# Altium footprint library FootPrintLib_11.PcbLib: 376 footprints (part 14 of 24)
Each footprint in its own frame and in the unit in brackets; x right, y up, seen from the top. Pads: shape width x height; smd on the part's side, far side on the other; paste and mask are expansions set on the pad; w line width, h text height; cw(c..) or ccw(c..) is an arc to the next point about the centre after c.
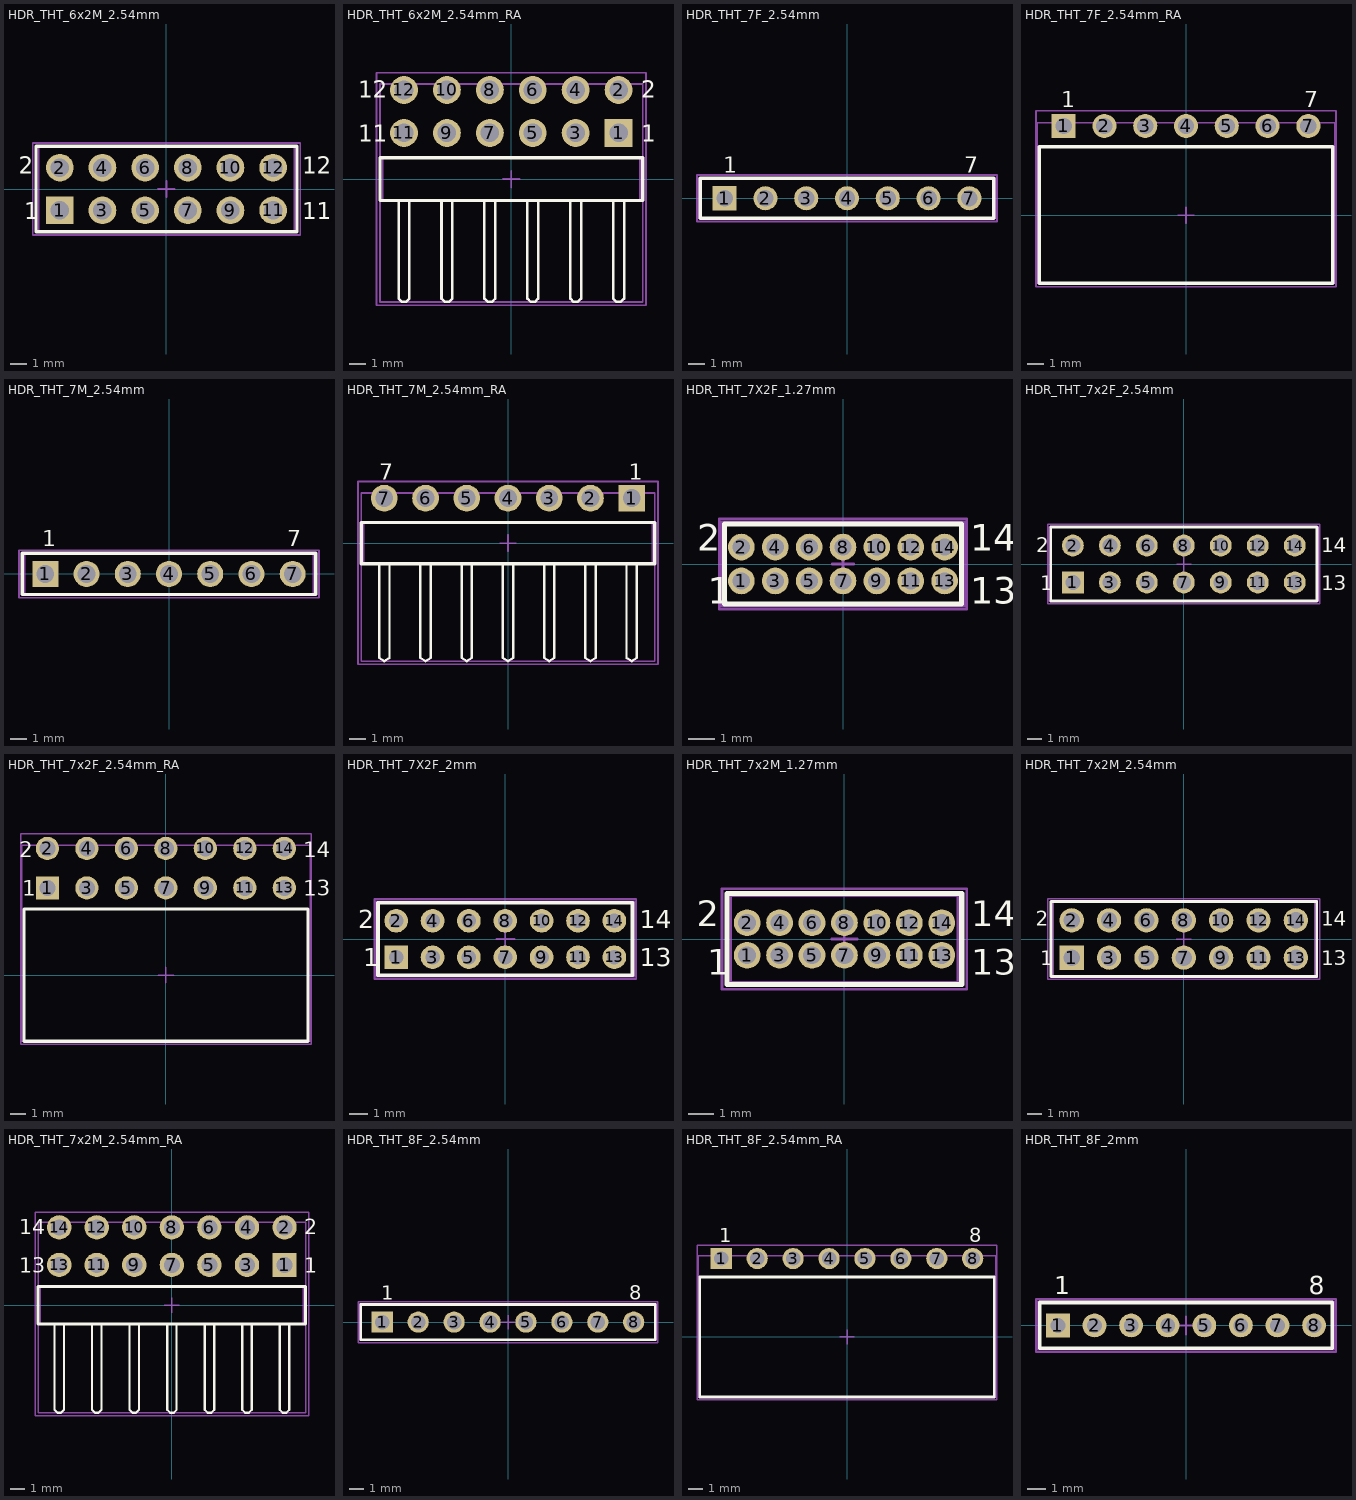
[diagram p13: the footprints below, top view; thin cyan lines are the x and y axes]

## HDR_THT_6x2M_2.54mm [mm] "Pin Header, pitch 2.54 mm, THT, Vertical, dual row, 12p"
height 8.54
pads (12):
  rect 1.65x1.65 hole 1.1: 1(-6.35,-1.27)
  round 1.65 hole 1.1: 2(-6.35,1.27) 3(-3.81,-1.27) 4(-3.81,1.27) 5(-1.27,-1.27) 6(-1.27,1.27) 7(1.27,-1.27) 8(1.27,1.27) 9(3.81,-1.27) 10(3.81,1.27) 11(6.35,-1.27) 12(6.35,1.27)
Top Overlay:
  lines w0.2: -7.77,-2.54 -7.77,2.54 7.77,2.54 7.77,-2.54 -7.77,-2.54
  text "12" at 8.08,0.9 h1
  text "11" at 8.08,-1.8 h1
  text "2" at -8.78,0.9 h1
  text "1" at -8.48,-1.8 h1
Mechanical 11:
  lines w0.1: -7.62,-2.54 -7.62,2.54 7.62,2.54 7.62,-2.54 -7.62,-2.54
Mechanical 13:
  lines w0.1: -7.77,-2.54 -7.77,2.54 7.77,2.54 7.77,-2.54 -7.77,-2.54
Mechanical 15:
  lines w0.1: -0.5,0 0.5,0 ; 0,-0.5 0,0.5 ; -7.97,-2.74 -7.97,2.74 7.97,2.74 7.97,-2.74 -7.97,-2.74
3D body "61301221121.stp": height 8.59, standoff -2.95, extent -7.62,-2.54 7.62,2.54

## HDR_THT_6x2M_2.54mm_RA [mm] "Pin Header, pitch 2.54 mm, THT, Angled, dual row, 12p"
height 5.08
pads (12):
  rect 1.65x1.65 hole 1.1: 1(6.35,2.73)
  round 1.65 hole 1.1: 2(6.35,5.27) 3(3.81,2.73) 4(3.81,5.27) 5(1.27,2.73) 6(1.27,5.27) 7(-1.27,2.73) 8(-1.27,5.27) 9(-3.81,2.73) 10(-3.81,5.27) 11(-6.35,2.73) 12(-6.35,5.27)
Top Overlay:
  lines w0.15: -6.67,-1.335 -6.67,-7.07 -6.47,-7.27 -6.23,-7.27 -6.03,-7.07 -6.03,-1.31 ; -4.13,-1.335 -4.13,-7.07 -3.93,-7.27 -3.69,-7.27 -3.49,-7.07 -3.49,-1.31 ; -1.59,-1.335 -1.59,-7.07 -1.39,-7.27 -1.15,-7.27 -0.95,-7.07 -0.95,-1.31 ; 0.95,-1.335 0.95,-7.07 1.15,-7.27 1.39,-7.27 1.59,-7.07 1.59,-1.31 ; 3.49,-1.335 3.49,-7.07 3.69,-7.27 3.93,-7.27 4.13,-7.07 4.13,-1.31 ; 6.03,-1.335 6.03,-7.07 6.23,-7.27 6.47,-7.27 6.67,-7.07 6.67,-1.31
  lines w0.2: -7.77,-1.27 7.77,-1.27 7.77,1.27 -7.77,1.27 -7.77,-1.27
  text "12" at -9.07,4.8 h1
  text "11" at -9.07,2.2 h1
  text "2" at 7.68,4.8 h1
  text "1" at 7.68,2.2 h1
Mechanical 11:
  lines w0.1: -7.62,-1.27 7.62,-1.27 7.62,1.27 -7.62,1.27 -7.62,-1.27
Mechanical 13:
  lines w0.1: -7.77,-7.27 -7.77,5.63 7.77,5.63 7.77,-7.27 -7.77,-7.27
Mechanical 15:
  lines w0.1: -0.5,0 0.5,0 ; 0,-0.5 0,0.5 ; -7.97,-7.47 -7.97,6.295 7.97,6.295 7.97,-7.47 -7.97,-7.47
3D body "61301221021.stp": height 5.14, standoff -2.94, extent -7.62,-7.27 7.62,5.63

## HDR_THT_7F_2.54mm [mm] "Socket Header, Pitch 2.54 mm, THT, Vertical, single row, 7p"
height 8.5
pads (7):
  rect 1.5x1.5 hole 1.02: 1(-7.62,0)
  round 1.5 hole 1.02: 2(-5.08,0) 3(-2.54,0) 4(0,0) 5(2.54,0) 6(5.08,0) 7(7.62,0)
Top Overlay:
  lines w0.2: -9.14,-1.25 9.14,-1.25 9.14,1.25 -9.14,1.25 -9.14,-1.25
  text "7" at 7.31,1.6 h1
  text "1" at -7.71,1.6 h1
Mechanical 11:
  lines w0.1: -9.14,-1.25 9.14,-1.25 9.14,1.25 -9.14,1.25 -9.14,-1.25
Mechanical 13:
  lines w0.1: -9.265,-1.25 -9.265,1.25 9.265,1.25 9.265,-1.25 -9.265,-1.25
Mechanical 15:
  lines w0.1: -0.5,0 0.5,0 ; 0,-0.5 0,0.5 ; -9.34,-1.45 -9.34,1.45 9.34,1.45 9.34,-1.45 -9.34,-1.45
3D body "61300711821.stp": height 8.55, standoff -3.06, extent -9.14,-1.25 9.14,1.25

## HDR_THT_7F_2.54mm_RA [mm] "Socket Header, Pitch 2.54 mm, THT, Angled, single row, 7p"
height 2.5
pads (7):
  rect 1.5x1.5 hole 1.02: 1(-7.62,5.55)
  round 1.5 hole 1.02: 2(-5.08,5.55) 3(-2.54,5.55) 4(0,5.55) 5(2.54,5.55) 6(5.08,5.55) 7(7.62,5.55)
Top Overlay:
  lines w0.2: -9.14,-4.25 -9.14,4.25 9.14,4.25 9.14,-4.25 -9.14,-4.25
  text "7" at 7.36,6.7 h1
  text "1" at -7.78,6.7 h1
Mechanical 11:
  lines w0.1: -9.14,-4.25 9.14,-4.25 9.14,4.25 -9.14,4.25 -9.14,-4.25
Mechanical 13:
  lines w0.1: -9.265,-4.25 -9.265,5.75 9.265,5.75 9.265,-4.25 -9.265,-4.25
Mechanical 15:
  lines w0.1: -0.5,0 0.5,0 ; 0,-0.5 0,0.5 ; -9.34,-4.45 -9.34,6.5 9.34,6.5 9.34,-4.45 -9.34,-4.45
3D body "613007143121.stp": height 2.55, standoff -3.04, extent -9.14,-4.25 9.14,5.75

## HDR_THT_7M_2.54mm [mm] "Pin Header, pitch 2.54 mm, THT, Vertical, single row, 7p"
height 8.54
pads (7):
  rect 1.6x1.6 hole 1.1: 1(-7.62,0)
  round 1.6 hole 1.1: 2(-5.08,0) 3(-2.54,0) 4(0,0) 5(2.54,0) 6(5.08,0) 7(7.62,0)
Top Overlay:
  lines w0.2: -9.04,-1.27 -9.04,1.27 9.04,1.27 9.04,-1.27 -9.04,-1.27
  text "7" at 7.27,1.7 h1
  text "1" at -7.81,1.7 h1
Mechanical 11:
  lines w0.1: -8.89,-1.27 8.89,-1.27 8.89,1.27 -8.89,1.27 -8.89,-1.27
Mechanical 13:
  lines w0.1: -9.04,-1.27 -9.04,1.27 9.04,1.27 9.04,-1.27 -9.04,-1.27
Mechanical 15:
  lines w0.1: -0.5,0 0.5,0 ; 0,-0.5 0,0.5 ; -9.24,-1.47 -9.24,1.47 9.24,1.47 9.24,-1.47 -9.24,-1.47
3D body "61300711121.stp": height 8.57, standoff -2.97, extent -8.89,-1.27 8.89,1.27

## HDR_THT_7M_2.54mm_RA [mm] "Pin Header, pitch 2.54 mm, THT, Angled, single row, 7p"
height 2.54
pads (7):
  rect 1.65x1.65 hole 1.1: 1(7.62,2.77)
  round 1.65 hole 1.1: 2(5.08,2.77) 3(2.54,2.77) 4(0,2.77) 5(-2.54,2.77) 6(-5.08,2.77) 7(-7.62,2.77)
Top Overlay:
  lines w0.15: -7.94,-1.27 -7.94,-7.07 -7.62,-7.27 -7.3,-7.07 -7.3,-1.27 ; -5.4,-1.27 -5.4,-7.07 -5.08,-7.27 -4.76,-7.07 -4.76,-1.27 ; -2.86,-1.27 -2.86,-7.07 -2.54,-7.27 -2.22,-7.07 -2.22,-1.27 ; -0.32,-1.27 -0.32,-7.07 0,-7.27 0.32,-7.07 0.32,-1.27 ; 2.22,-1.27 2.22,-7.07 2.54,-7.27 2.86,-7.07 2.86,-1.27 ; 4.76,-1.27 4.76,-7.07 5.08,-7.27 5.4,-7.07 5.4,-1.27 ; 7.3,-1.27 7.3,-7.07 7.62,-7.27 7.94,-7.07 7.94,-1.27
  lines w0.2: -9.04,-1.27 9.04,-1.27 9.04,1.27 -9.04,1.27 -9.04,-1.27
  text "1" at 7.45,3.9 h1
  text "7" at -7.94,3.9 h1
Mechanical 11:
  lines w0.1: -8.89,-1.27 8.89,-1.27 8.89,1.27 -8.89,1.27 -8.89,-1.27
Mechanical 13:
  lines w0.1: -9.04,-7.27 9.04,-7.27 9.04,3.09 -9.04,3.09 -9.04,-7.27
Mechanical 15:
  lines w0.1: -0.5,0 0.5,0 ; 0,-0.5 0,0.5 ; -9.24,-7.47 -9.24,3.795 9.24,3.795 9.24,-7.47 -9.24,-7.47
3D body "61300711021.stp": height 2.62, standoff -2.92, extent -8.89,-7.27 8.89,3.09

## HDR_THT_7X2F_1.27mm [mm] "Socket Header, Pitch 1.27 mm, THT, Vertical, dual row, 14p"
height 4.65
pads (14):
  round 1 hole 0.65: 1(-3.81,-0.635) 2(-3.81,0.635) 3(-2.54,-0.635) 4(-2.54,0.635) 5(-1.27,-0.635) 6(-1.27,0.635) 7(0,-0.635) 8(0,0.635) 9(1.27,-0.635) 10(1.27,0.635) 11(2.54,-0.635) 12(2.54,0.635) 13(3.81,-0.635) 14(3.81,0.635)
Top Overlay:
  lines w0.2: -4.445,-1.5 4.445,-1.5 4.445,1.5 -4.445,1.5 -4.445,-1.5
  text "14" at 4.775,0.5 h1
  text "13" at 4.775,-1.5 h1
  text "2" at -5.475,0.5 h1
  text "1" at -5.075,-1.5 h1
Mechanical 11:
  lines w0.1: -4.445,-1.5 4.445,-1.5 4.445,1.5 -4.445,1.5 -4.445,-1.5
Mechanical 13:
  lines w0.1: -4.57,-1.575 -4.57,1.575 4.57,1.575 4.57,-1.575 -4.57,-1.575
Mechanical 15:
  lines w0.1: -0.4,0 0.4,0 ; 0,-0.4 0,0.4 ; -4.645,-1.7 4.645,-1.7 4.645,1.7 -4.645,1.7 -4.645,-1.7
3D body "62201421821.stp": height 4.55, standoff -2.15, extent -4.645,-1.5 4.645,1.5

## HDR_THT_7x2F_2.54mm [mm] "Socket Header, Pitch 2.54 mm, THT, Vertical, dual row, 14p"
height 8.4
pads (14):
  rect 1.5x1.5 hole 1.02: 1(-7.62,-1.27)
  round 1.5 hole 1.02: 2(-7.62,1.27) 3(-5.08,-1.27) 4(-5.08,1.27) 5(-2.54,-1.27) 6(-2.54,1.27) 7(0,-1.27) 8(0,1.27) 9(2.54,-1.27) 10(2.54,1.27) 11(5.08,-1.27) 12(5.08,1.27) 13(7.62,-1.27) 14(7.62,1.27)
Top Overlay:
  lines w0.2: -9.14,-2.54 -9.14,2.54 9.14,2.54 9.14,-2.54 -9.14,-2.54
  text "2" at -10.15,0.8 h1
  text "1" at -9.85,-1.8 h1
  text "13" at 9.45,-1.8 h1
  text "14" at 9.45,0.8 h1
Mechanical 11:
  lines w0.1: -9.14,-2.54 9.14,-2.54 9.14,2.54 -9.14,2.54 -9.14,-2.54
Mechanical 13:
  lines w0.1: -9.265,-2.54 -9.265,2.54 9.265,2.54 9.265,-2.54 -9.265,-2.54
Mechanical 15:
  lines w0.1: -0.5,0 0.5,0 ; 0,-0.5 0,0.5 ; -9.34,-2.74 -9.34,2.74 9.34,2.74 9.34,-2.74 -9.34,-2.74
3D body "61301421821.stp": height 8.45, standoff -3.05, extent -9.14,-2.54 9.14,2.54

## HDR_THT_7x2F_2.54mm_RA [mm] "Socket Header, Pitch 2.54 mm, THT, Angled, dual row, 14p"
height 5.08
pads (14):
  rect 1.5x1.5 hole 1.02: 1(-7.62,5.61)
  round 1.5 hole 1.02: 2(-7.62,8.15) 3(-5.08,5.61) 4(-5.08,8.15) 5(-2.54,5.61) 6(-2.54,8.15) 7(0,5.61) 8(0,8.15) 9(2.54,5.61) 10(2.54,8.15) 11(5.08,5.61) 12(5.08,8.15) 13(7.62,5.61) 14(7.62,8.15)
Top Overlay:
  lines w0.2: -9.14,-4.25 -9.14,4.25 9.14,4.25 9.14,-4.25 -9.14,-4.25
  text "14" at 8.85,7.6 h1
  text "13" at 8.85,5.1 h1
  text "2" at -9.45,7.6 h1
  text "1" at -9.25,5.1 h1
Mechanical 11:
  lines w0.1: -9.14,-4.25 9.14,-4.25 9.14,4.25 -9.14,4.25 -9.14,-4.25
Mechanical 13:
  lines w0.1: -9.29,-4.25 9.29,-4.25 9.29,8.35 -9.29,8.35 -9.29,-4.25
Mechanical 15:
  lines w0.1: -0.5,0 0.5,0 ; 0,-0.5 0,0.5 ; -9.34,-4.45 9.34,-4.45 9.34,9.1 -9.34,9.1 -9.34,-4.45
3D body "613014243121.stp": height 5.05, standoff -3.25, extent -9.14,-4.25 9.14,8.35

## HDR_THT_7X2F_2mm [mm] "Socket Header, Pitch 2.00 mm, THT, Vertical, dual row, 14p"
height 4.45
pads (14):
  rect 1.3x1.3 hole 0.8: 1(-6,-1)
  round 1.3 hole 0.8: 2(-6,1) 3(-4,-1) 4(-4,1) 5(-2,-1) 6(-2,1) 7(0,-1) 8(0,1) 9(2,-1) 10(2,1) 11(4,-1) 12(4,1) 13(6,-1) 14(6,1)
Top Overlay:
  lines w0.2: -7,-2 -7,2 7,2 7,-2 -7,-2
  text "1" at -7.8,-1.5 h1
  text "2" at -8.1,0.6 h1
  text "14" at 7.4,0.6 h1
  text "13" at 7.4,-1.5 h1
Mechanical 11:
  lines w0.1: -7,-2 -7,2 7,2 7,-2 -7,-2
Mechanical 13:
  lines w0.1: -7.15,-2.075 -7.15,2.075 7.15,2.075 7.15,-2.075 -7.15,-2.075
Mechanical 15:
  lines w0.1: -0.5,0 0.5,0 ; 0,-0.5 0,0.5 ; -7.2,-2.2 -7.2,2.2 7.2,2.2 7.2,-2.2 -7.2,-2.2
3D body "62001421821.stp": height 4.35, standoff -2.35, extent -7.25,-2 7.25,2

## HDR_THT_7x2M_1.27mm [mm] "Pin Header, pitch 1.27 mm, THT, Vertical, dual row, 14p"
height 5.65
pads (14):
  round 1.05 hole 0.7: 1(-3.81,-0.635) 2(-3.81,0.635) 3(-2.54,-0.635) 4(-2.54,0.635) 5(-1.27,-0.635) 6(-1.27,0.635) 7(0,-0.635) 8(0,0.635) 9(1.27,-0.635) 10(1.27,0.635) 11(2.54,-0.635) 12(2.54,0.635) 13(3.81,-0.635) 14(3.81,0.635)
Top Overlay:
  lines w0.2: -4.595,-1.775 4.595,-1.775 4.595,1.775 -4.595,1.775 -4.595,-1.775
  text "2" at -5.775,0.5 h1
  text "1" at -5.375,-1.4 h1
  text "13" at 4.975,-1.4 h1
  text "14" at 4.975,0.5 h1
Mechanical 11:
  lines w0.1: -4.445,-1.7 4.445,-1.7 4.445,1.7 -4.445,1.7 -4.445,-1.7
Mechanical 13:
  lines w0.1: -4.595,-1.775 4.595,-1.775 4.595,1.775 -4.595,1.775 -4.595,-1.775
Mechanical 15:
  lines w0.1: -0.5,0 0.5,0 ; 0,-0.5 0,0.5 ; -4.795,-1.975 -4.795,1.975 4.795,1.975 4.795,-1.975 -4.795,-1.975
3D body "62201421121.stp": height 5.33, standoff -2.27, extent -4.445,-1.7 4.445,1.7

## HDR_THT_7x2M_2.54mm [mm] "Pin Header, pitch 2.54 mm, THT, Vertical, dual row, 14p"
height 8.54
pads (14):
  rect 1.65x1.65 hole 1.1: 1(-7.62,-1.27)
  round 1.65 hole 1.1: 2(-7.62,1.27) 3(-5.08,-1.27) 4(-5.08,1.27) 5(-2.54,-1.27) 6(-2.54,1.27) 7(0,-1.27) 8(0,1.27) 9(2.54,-1.27) 10(2.54,1.27) 11(5.08,-1.27) 12(5.08,1.27) 13(7.62,-1.27) 14(7.62,1.27)
Top Overlay:
  lines w0.2: -9.04,-2.54 -9.04,2.54 9.04,2.54 9.04,-2.54 -9.04,-2.54
  text "14" at 9.35,0.9 h1
  text "13" at 9.35,-1.8 h1
  text "2" at -10.05,0.9 h1
  text "1" at -9.75,-1.8 h1
Mechanical 11:
  lines w0.1: -8.89,-2.54 -8.89,2.54 8.89,2.54 8.89,-2.54 -8.89,-2.54
Mechanical 13:
  lines w0.1: -9.04,-2.54 -9.04,2.54 9.04,2.54 9.04,-2.54 -9.04,-2.54
Mechanical 15:
  lines w0.1: -0.5,0 0.5,0 ; 0,-0.5 0,0.5 ; -9.24,-2.74 -9.24,2.74 9.24,2.74 9.24,-2.74 -9.24,-2.74
3D body "61301421121.stp": height 8.59, standoff -2.95, extent -8.89,-2.54 8.89,2.54

## HDR_THT_7x2M_2.54mm_RA [mm] "Pin Header, pitch 2.54 mm, THT, Angled, dual row, 14p"
height 5.08
pads (14):
  rect 1.65x1.65 hole 1.1: 1(7.62,2.73)
  round 1.65 hole 1.1: 2(7.62,5.27) 3(5.08,2.73) 4(5.08,5.27) 5(2.54,2.73) 6(2.54,5.27) 7(0,2.73) 8(0,5.27) 9(-2.54,2.73) 10(-2.54,5.27) 11(-5.08,2.73) 12(-5.08,5.27) 13(-7.62,2.73) 14(-7.62,5.27)
Top Overlay:
  lines w0.15: -7.94,-1.335 -7.94,-7.07 -7.74,-7.27 -7.5,-7.27 -7.3,-7.07 -7.3,-1.31 ; -5.4,-1.335 -5.4,-7.07 -5.2,-7.27 -4.96,-7.27 -4.76,-7.07 -4.76,-1.31 ; -2.86,-1.335 -2.86,-7.07 -2.66,-7.27 -2.42,-7.27 -2.22,-7.07 -2.22,-1.31 ; -0.32,-1.335 -0.32,-7.07 -0.12,-7.27 0.12,-7.27 0.32,-7.07 0.32,-1.31 ; 2.22,-1.335 2.22,-7.07 2.42,-7.27 2.66,-7.27 2.86,-7.07 2.86,-1.31 ; 4.76,-1.335 4.76,-7.07 4.96,-7.27 5.2,-7.27 5.4,-7.07 5.4,-1.31 ; 7.3,-1.335 7.3,-7.07 7.5,-7.27 7.74,-7.27 7.94,-7.07 7.94,-1.31
  lines w0.2: -9.04,-1.27 -9.04,1.27 9.04,1.27 9.04,-1.27 -9.04,-1.27
  text "1" at 8.95,2.2 h1
  text "2" at 8.95,4.8 h1
  text "14" at -10.34,4.8 h1
  text "13" at -10.34,2.2 h1
Mechanical 11:
  lines w0.1: -8.89,-1.27 -8.89,1.27 8.89,1.27 8.89,-1.27 -8.89,-1.27
Mechanical 13:
  lines w0.1: -9.04,-7.27 9.04,-7.27 9.04,5.63 -9.04,5.63 -9.04,-7.27
Mechanical 15:
  lines w0.1: -0.5,0 0.5,0 ; 0,-0.5 0,0.5 ; -9.24,-7.47 9.24,-7.47 9.24,6.295 -9.24,6.295 -9.24,-7.47
3D body "61301421021.stp": height 5.14, standoff -2.94, extent -8.89,-7.27 8.89,5.63

## HDR_THT_8F_2.54mm [mm] "Socket Header, Pitch 2.54 mm, THT, Vertical, single row, 8p"
height 8.5
pads (8):
  rect 1.5x1.5 hole 1.02: 1(-8.89,0)
  round 1.5 hole 1.02: 2(-6.35,0) 3(-3.81,0) 4(-1.27,0) 5(1.27,0) 6(3.81,0) 7(6.35,0) 8(8.89,0)
Top Overlay:
  lines w0.2: -10.41,-1.25 10.41,-1.25 10.41,1.25 -10.41,1.25 -10.41,-1.25
  text "8" at 8.58,1.6 h1
  text "1" at -8.98,1.6 h1
Mechanical 11:
  lines w0.1: -10.41,-1.25 10.41,-1.25 10.41,1.25 -10.41,1.25 -10.41,-1.25
Mechanical 13:
  lines w0.1: -10.535,-1.25 -10.535,1.25 10.535,1.25 10.535,-1.25 -10.535,-1.25
Mechanical 15:
  lines w0.1: -0.5,0 0.5,0 ; 0,-0.5 0,0.5 ; -10.61,-1.45 -10.61,1.45 10.61,1.45 10.61,-1.45 -10.61,-1.45
3D body "61300811821.stp": height 8.55, standoff -3.06, extent -10.41,-1.25 10.41,1.25

## HDR_THT_8F_2.54mm_RA [mm] "Socket Header, Pitch 2.54 mm, THT, Angled, single row, 18p"
height 2.5
pads (8):
  rect 1.5x1.5 hole 1.02: 1(-8.89,5.55)
  round 1.5 hole 1.02: 2(-6.35,5.55) 3(-3.81,5.55) 4(-1.27,5.55) 5(1.27,5.55) 6(3.81,5.55) 7(6.35,5.55) 8(8.89,5.55)
Top Overlay:
  lines w0.2: -10.41,-4.25 10.41,-4.25 10.41,4.25 -10.41,4.25 -10.41,-4.25
  text "8" at 8.63,6.7 h1
  text "1" at -9.05,6.7 h1
Mechanical 11:
  lines w0.1: -10.41,-4.25 -10.41,4.25 10.41,4.25 10.41,-4.25 -10.41,-4.25
Mechanical 13:
  lines w0.1: -10.535,-4.25 10.535,-4.25 10.535,5.75 -10.535,5.75 -10.535,-4.25
Mechanical 15:
  lines w0.1: -0.5,0 0.5,0 ; 0,-0.5 0,0.5 ; -10.61,-4.45 10.61,-4.45 10.61,6.5 -10.61,6.5 -10.61,-4.45
3D body "613008143121.stp": height 2.55, standoff -3.04, extent -10.41,-4.25 10.41,5.75

## HDR_THT_8F_2mm [mm] "Socket Header, Pitch 2.00 mm, THT, Vertical, single row, 8p"
height 4.45
pads (8):
  rect 1.3x1.3 hole 0.8: 1(-7,0)
  round 1.3 hole 0.8: 2(-5,0) 3(-3,0) 4(-1,0) 5(1,0) 6(3,0) 7(5,0) 8(7,0)
Top Overlay:
  lines w0.2: -8,-1.25 -8,1.25 8,1.25 8,-1.25 -8,-1.25
  text "8" at 6.7,1.7 h1
  text "1" at -7.2,1.7 h1
Mechanical 11:
  lines w0.1: -8,-1.25 -8,1.25 8,1.25 8,-1.25 -8,-1.25
Mechanical 13:
  lines w0.1: -8.15,-1.325 -8.15,1.325 8.15,1.325 8.15,-1.325 -8.15,-1.325
Mechanical 15:
  lines w0.1: -0.5,0 0.5,0 ; 0,-0.5 0,0.5 ; -8.2,-1.45 -8.2,1.45 8.2,1.45 8.2,-1.45 -8.2,-1.45
3D body "62000811821.stp": height 4.35, standoff -2.65, extent -8.25,-1.25 8.25,1.25